# Altium schematic symbol library PTZ.SchLib: 104 symbols (part 4 of 4)
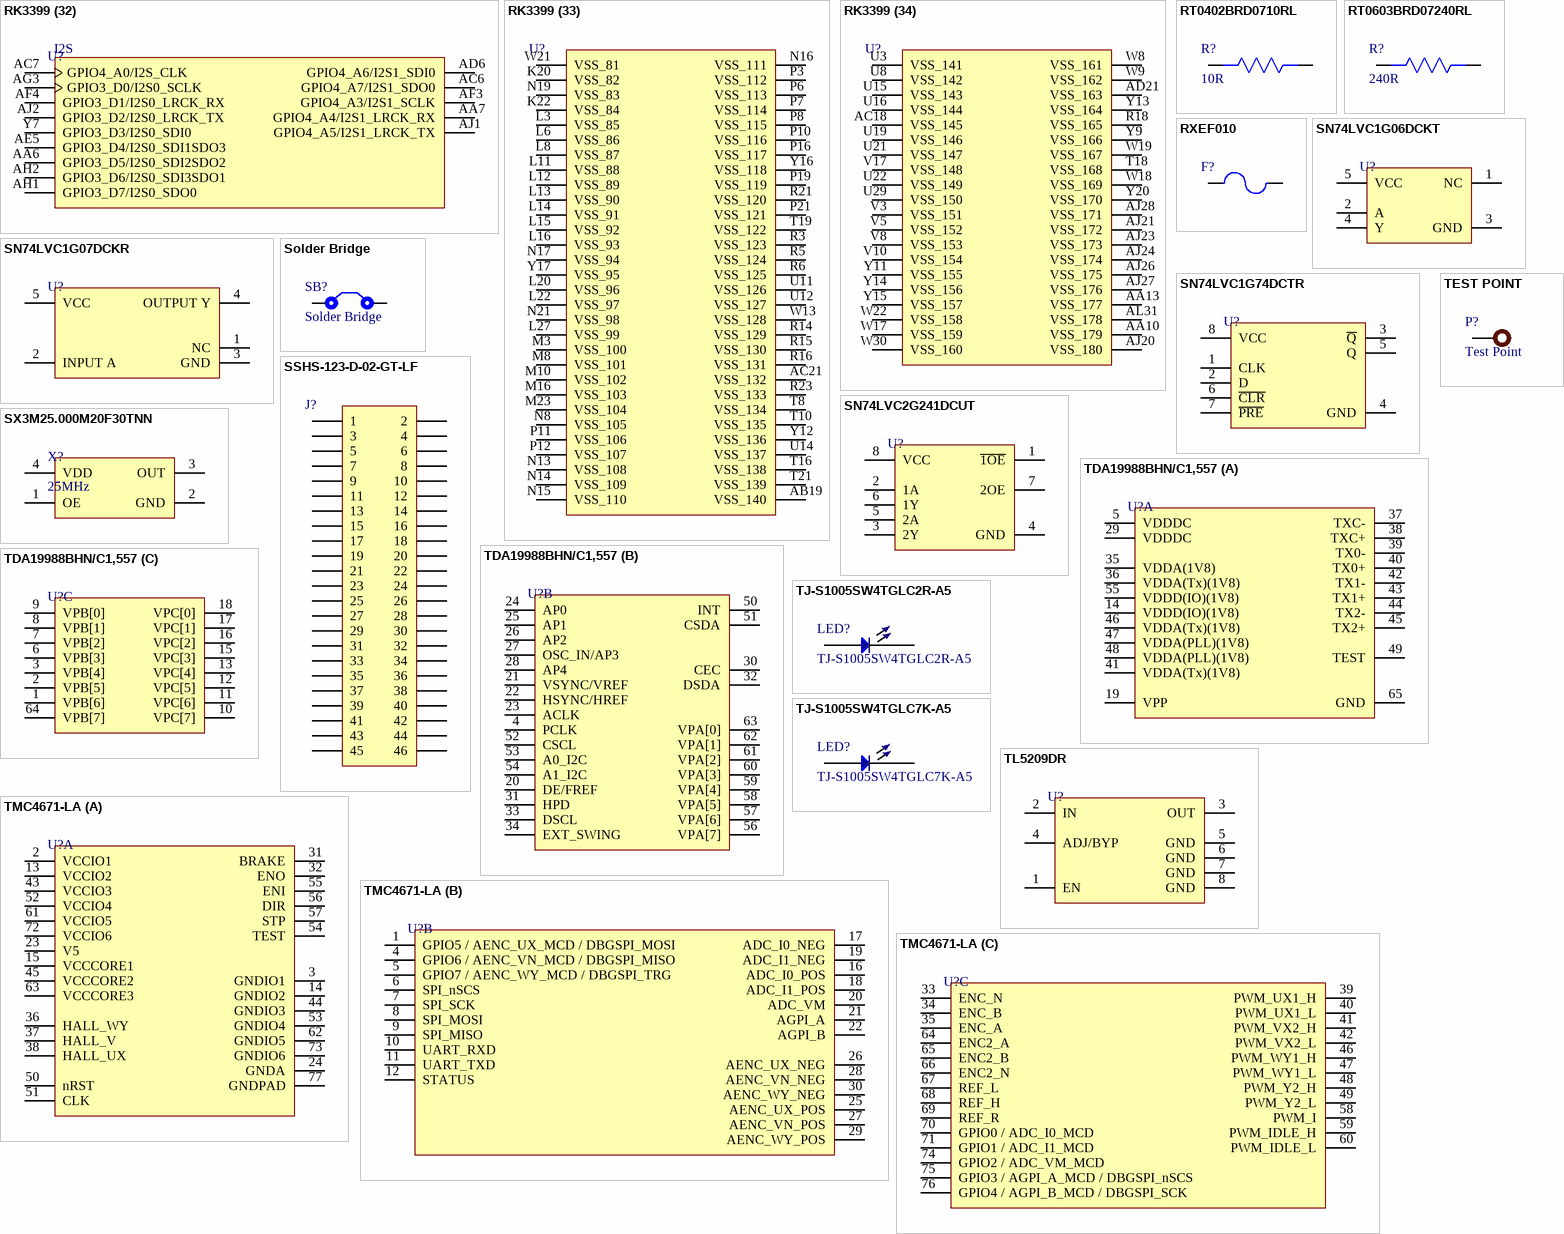
[diagram p9: symbols RK3399 to TMC4671-LA]

## RXEF010
designator F?
PTC RESET FUSE 60V 100MA RADIAL; Manufacturer: TE Connectivity; Manufacturer Part Number: RXEF010; Supplier 1: Avnet; RoHS: Yes; Category: PTC Resettable Fuses; Pricing 1: 1=0.25702, 10=0.24978, 30=0.24254, 50=0.23530, 100=0.22806, 250=0.22082, 500=0.21358 (USD); ComponentLink1URL: https://datasheet.ciiva.com/4501/ng-ss-scd25213-e-166409-4501426.pdf?src-supplier=Mouser; ComponentLink1Description: https://datasheet.ciiva.com/4501/ng-ss-scd25213-e-166409-4501426.pdf?src-supplier=Mouser; ComponentLink2URL: https://datasheet.ciiva.com/30563/rf2579-000-teconnectivitycircuitprotection-30563506.pdf?src-supplier=Onlinecomponents.com; ComponentLink2Description: https://datasheet.ciiva.com/30563/rf2579-000-teconnectivitycircuitprotection-30563506.pdf?src-supplier=Onlinecomponents.com; ComponentLink3URL: https://datasheet.ciiva.com/17090/rxef010-17090552.pdf?src-supplier=Future+Electronics; ComponentLink3Description: https://datasheet.ciiva.com/17090/rxef010-17090552.pdf?src-supplier=Future+Electronics; ComponentLink4URL: https://datasheet.ciiva.com/326/eng-ss-scd25213-e-326021.pdf?src-supplier=Digi-Key; ComponentLink4Description: https://datasheet.ciiva.com/326/eng-ss-scd25213-e-326021.pdf?src-supplier=Digi-Key; ComponentLink5URL: https://datasheet.ciiva.com/31841/eng-cs-radial-leaded-a-31841127.pdf?src-supplier=Onlinecomponents.com; ComponentLink5Description: https://datasheet.ciiva.com/31841/eng-cs-radial-leaded-a-31841127.pdf?src-supplier=Onlinecomponents.com; ComponentLink6URL: https://datasheet.ciiva.com/16207/3922310809194634439223083539498648eng-cs-radial-leaded-a-16207340.pdf?src-supplier=Onlinecomponents.com; ComponentLink6Description: https://datasheet.ciiva.com/16207/3922310809194634439223083539498648eng-cs-radial-leaded-a-16207340.pdf?src-supplier=Onlinecomponents.com; ComponentLink7URL: https://datasheet.ciiva.com/8011/1482689-8011404.pdf?src-supplier=Element14; ComponentLink7Description: https://datasheet.ciiva.com/8011/1482689-8011404.pdf?src-supplier=Element14; Supplier Part Number 1: RXEF010
footprint RXEF010
pins: 1, 2

## SN74LVC1G06DCKT
designator U?
IC BUFFER INVERT 5.5V SC70-5; Manufacturer: Texas Instruments; Manufacturer Part Number: SN74LVC1G06DCKT; Logic Function: Buffer,Inverter; Number of Channels: 1; Min Supply Voltage: 1.65V; Propagation Delay: 3ns; Low Level Output Current: 32mA; Polarity: Inverting; Quiescent Current: 10uA; Turn-On Delay Time: 6.5ns; Supplier 1: Mouser; RoHS: Yes; Category: Buffers, Drivers and Transceivers; Pricing 1: 1=0.94000, 10=0.84500, 50=0.80200, 100=0.65900, 1000=0.61500, 10000=0.61500 (USD); Mount: Surface Mount; Case/Package: SC; Number of Pins: 5; Contact Plating: Gold; Min Operating Temperature: -40°C; Max Operating Temperature: 125°C; Packaging: Tape and Reel; Number of Inputs: 1; Number of Outputs: 1; Max Supply Voltage: 5.5V; Package Quantity: 250; Number of Input Lines: 1; Number of Output Lines: 1; Number of Elements: 1; Number of Gates: 1; Number of Bits: 1; Series: 74LVC; Technology: CMOS; Number of Circuits: 1; Termination: SMD/SMT; Output Current: 32mA; Max Output Current: 32mA; High Level Output Current: 32mA; Radiation Hardening: No; Lead Free: Lead Free; RoHS Compliant: Yes; REACH SVHC: No SVHC; ComponentLink1URL: https://datasheet.ciiva.com/22699/1834831-22699052.pdf?src-supplier=Element14; ComponentLink1Description: https://datasheet.ciiva.com/22699/1834831-22699052.pdf?src-supplier=Element14; ComponentLink2URL: https://datasheet.ciiva.com/15094/getdatasheetpartid-76670-15094549.pdf?src-supplier=Verical; ComponentLink2Description: https://datasheet.ciiva.com/15094/getdatasheetpartid-76670-15094549.pdf?src-supplier=Verical; ComponentLink3URL: https://datasheet.ciiva.com/41456/001017125-da-01-en-ic-single-1in-sn74lvc1g06dckt-sot-5-tid-41456047.pdf?src-supplier=Conrad; ComponentLink3Description: https://datasheet.ciiva.com/41456/001017125-da-01-en-ic-single-1in-sn74lvc1g06dckt-sot-5-tid-41456047.pdf?src-supplier=Conrad; ComponentLink4URL: https://datasheet.ciiva.com/6620/sn74lvc1g06-6620044.pdf?src-supplier=Digi-Key; ComponentLink4Description: https://datasheet.ciiva.com/6620/sn74lvc1g06-6620044.pdf?src-supplier=Digi-Key; ComponentLink5URL: https://datasheet.ciiva.com/6620/sn74lvc1g06-6620042.pdf?src-supplier=Digi-Key; ComponentLink5Description: https://datasheet.ciiva.com/6620/sn74lvc1g06-6620042.pdf?src-supplier=Digi-Key; ComponentLink6URL: https://datasheet.ciiva.com/6620/sn74lvc1g06-6620045.pdf?src-supplier=Digi-Key; ComponentLink6Description: https://datasheet.ciiva.com/6620/sn74lvc1g06-6620045.pdf?src-supplier=Digi-Key; Supplier Part Number 1: 595-SN74LVC1G06DCKT
footprint SC-70-5
pins: 1 NC, 2 A, 3 GND, 4 Y, 5 VCC

## SN74LVC1G07DCKR
designator U?
IC BUF NON-INVERT 5.5V SC70-5; Manufacturer: Texas Instruments; Manufacturer Part Number: SN74LVC1G07DCKR; Number of Channels: 1; Min Supply Voltage: 1.65V; Propagation Delay: 8.3ns; Logic Function: Buffer,Inverting; Low Level Output Current: 32mA; Polarity: Non-Inverting; Quiescent Current: 10uA; Nominal Supply Current: 40mA; Supplier 1: Mouser; RoHS: Yes; Category: Buffers, Drivers and Transceivers; Pricing 1: 1=0.34000, 10=0.25400, 50=0.25400, 100=0.12800, 500=0.09600, 1000=0.07400, 3000=0.05700, 10000=0.05700 (USD); Mount: Surface Mount; Case/Package: SC; Number of Pins: 5; Contact Plating: Gold; Min Operating Temperature: -40°C; Max Operating Temperature: 125°C; Number of Inputs: 1; Number of Outputs: 1; Max Supply Voltage: 5.5V; Packaging: Tape and Reel; Package Quantity: 1; Number of Elements: 1; Number of Input Lines: 1; Number of Output Lines: 1; Number of Bits per Element: 1; Turn-On Delay Time: 8.3ns; Number of Gates: 1; Number of Bits: 1; High Level Output Current: 32mA; Termination: SMD/SMT; Number of Circuits: 1; Radiation Hardening: No; REACH SVHC: No SVHC; Lead Free: Lead Free; RoHS Compliant: Yes; ComponentLink1URL: https://datasheet.ciiva.com/15094/getdatasheetpartid-189690-15094949.pdf?src-supplier=Verical; ComponentLink1Description: https://datasheet.ciiva.com/15094/getdatasheetpartid-189690-15094949.pdf?src-supplier=Verical; ComponentLink2URL: https://datasheet.ciiva.com/4788/sn74lvc1g07-224894-4788496.pdf?src-supplier=Mouser; ComponentLink2Description: https://datasheet.ciiva.com/4788/sn74lvc1g07-224894-4788496.pdf?src-supplier=Mouser; ComponentLink3URL: https://datasheet.ciiva.com/28662/1887570-28662702.pdf?src-supplier=Element14; ComponentLink3Description: https://datasheet.ciiva.com/28662/1887570-28662702.pdf?src-supplier=Element14; ComponentLink4URL: https://datasheet.ciiva.com/46384/1887570-46384078.pdf?src-supplier=Element14; ComponentLink4Description: https://datasheet.ciiva.com/46384/1887570-46384078.pdf?src-supplier=Element14; ComponentLink5URL: https://datasheet.ciiva.com/46442/1856316-46442060.pdf?src-supplier=Element14; ComponentLink5Description: https://datasheet.ciiva.com/46442/1856316-46442060.pdf?src-supplier=Element14; ComponentLink6URL: https://datasheet.ciiva.com/1833/sn74lvc1g07-1833619.pdf?src-supplier=Digi-Key; ComponentLink6Description: https://datasheet.ciiva.com/1833/sn74lvc1g07-1833619.pdf?src-supplier=Digi-Key; ComponentLink7URL: https://datasheet.ciiva.com/1833/sn74lvc1g07-1833618.pdf?src-supplier=Digi-Key; ComponentLink7Description: https://datasheet.ciiva.com/1833/sn74lvc1g07-1833618.pdf?src-supplier=Digi-Key; ComponentLink8URL: https://datasheet.ciiva.com/1833/sn74lvc1g07-1833620.pdf?src-supplier=Digi-Key; ComponentLink8Description: https://datasheet.ciiva.com/1833/sn74lvc1g07-1833620.pdf?src-supplier=Digi-Key; ComponentLink9URL: https://datasheet.ciiva.com/14300/sn74lvc1g07-14300981.pdf?src-supplier=Avnet; ComponentLink9Description: https://datasheet.ciiva.com/14300/sn74lvc1g07-14300981.pdf?src-supplier=Avnet; ComponentLink10URL: https://datasheet.ciiva.com/48704/001075278-da-01-en-ic-buff-dvr-sn74lvc1g07dckr-sc-70-5-tid-48704263.pdf?src-supplier=Conrad; ComponentLink10Description: https://datasheet.ciiva.com/48704/001075278-da-01-en-ic-buff-dvr-sn74lvc1g07dckr-sc-70-5-tid-48704263.pdf?src-supplier=Conrad; Supplier Part Number 1: 595-SN74LVC1G07DCKR
footprint SC-70-5
pins: 1 NC, 2 INPUT A, 3 GND, 4 OUTPUT Y, 5 VCC

## SN74LVC1G74DCTR
designator U?
IC FF D-TYPE SNGL 1BIT SM8; Manufacturer: Texas Instruments; Manufacturer Part Number: SN74LVC1G74DCTR; Propagation Delay: 1.6ns; Max Supply Voltage: 5.5V; Min Supply Voltage: 1.65V; Frequency: 200MHz; Clock Edge Trigger Type: Positive Edge; Output Current: 50mA; Number of Elements: 1; Logic Function: D-Type,Flip-Flop,AND GATE; Low Level Output Current: 32mA; High Level Output Current: -32mA; Polarity: Non-Inverting; Quiescent Current: 10uA; Number of Gates: 2; Supplier 1: Mouser; RoHS: Yes; Category: Latches and Flip Flops; Pricing 1: 1=0.84000, 10=0.73500, 50=0.73500, 100=0.56400, 1000=0.35700, 10000=0.32300 (USD); Mount: Surface Mount; Case/Package: SSOP; Number of Pins: 8; Contact Plating: Gold; Min Operating Temperature: -40°C; Max Operating Temperature: 125°C; Packaging: Tape and Reel; Package Quantity: 3000; Number of Circuits: 1; Number of Bits per Element: 1; Turn-On Delay Time: 1.6ns; Number of Bits: 1; Radiation Hardening: No; REACH SVHC: No SVHC; Lead Free: Lead Free; RoHS Compliant: Yes; ComponentLink1URL: https://datasheet.ciiva.com/22713/1737046-22713435.pdf?src-supplier=Element14; ComponentLink1Description: https://datasheet.ciiva.com/22713/1737046-22713435.pdf?src-supplier=Element14; ComponentLink2URL: https://datasheet.ciiva.com/8055/1874765-8055607.pdf?src-supplier=Element14; ComponentLink2Description: https://datasheet.ciiva.com/8055/1874765-8055607.pdf?src-supplier=Element14; ComponentLink3URL: https://datasheet.ciiva.com/46383/1885964-46383813.pdf?src-supplier=Element14; ComponentLink3Description: https://datasheet.ciiva.com/46383/1885964-46383813.pdf?src-supplier=Element14; ComponentLink4URL: https://datasheet.ciiva.com/1856/sn74lvc1g74-1856665.pdf?src-supplier=Digi-Key; ComponentLink4Description: https://datasheet.ciiva.com/1856/sn74lvc1g74-1856665.pdf?src-supplier=Digi-Key; ComponentLink5URL: https://datasheet.ciiva.com/1856/sn74lvc1g74-1856664.pdf?src-supplier=Digi-Key; ComponentLink5Description: https://datasheet.ciiva.com/1856/sn74lvc1g74-1856664.pdf?src-supplier=Digi-Key; ComponentLink6URL: https://datasheet.ciiva.com/1856/sn74lvc1g74-1856666.pdf?src-supplier=Digi-Key; ComponentLink6Description: https://datasheet.ciiva.com/1856/sn74lvc1g74-1856666.pdf?src-supplier=Digi-Key; ComponentLink7URL: https://datasheet.ciiva.com/14314/sn74lvc1g74-14314669.pdf?src-supplier=Avnet; ComponentLink7Description: https://datasheet.ciiva.com/14314/sn74lvc1g74-14314669.pdf?src-supplier=Avnet; ComponentLink8URL: https://datasheet.ciiva.com/14292/sn74lvc1g74-14292460.pdf?src-supplier=Avnet; ComponentLink8Description: https://datasheet.ciiva.com/14292/sn74lvc1g74-14292460.pdf?src-supplier=Avnet; Supplier Part Number 1: 595-SN74LVC1G74DCTR
footprint SM8
pins: 1 CLK, 2 D, 3 ~{Q}, 4 GND, 5 Q, 6 ~{CLR}, 7 ~{PRE}, 8 VCC

## SN74LVC2G241DCUT
designator U?
IC BUFFER NON-INVERT 5.5V 8VSSOP; Manufacturer: Texas Instruments; Manufacturer Part Number: SN74LVC2G241DCUT; Number of Elements: 2; Min Supply Voltage: 1.65V; Propagation Delay: 3.7ns; Logic Function: Buffer,Inverting; High Level Output Current: -32mA; Low Level Output Current: 32mA; Turn-On Delay Time: 12.5ns; Quiescent Current: 10uA; Number of Bits per Element: 1; Polarity: Non-Inverting; Output Type: 3-STATE; Supplier 1: Arrow Electronics; RoHS: Yes; Category: Buffers, Drivers and Transceivers; Stock 1: 92; Pricing 1: 1=0.68240, 10=0.58260, 25=0.57680 (USD); Mount: Surface Mount; Case/Package: VSSOP; Number of Pins: 8; Contact Plating: Gold; Min Operating Temperature: -40°C; Max Operating Temperature: 125°C; Package Quantity: 250; Packaging: Tape and Reel; Max Supply Voltage: 5.5V; Number of Inputs: 2; Number of Outputs: 2; Number of Input Lines: 2; Number of Output Lines: 2; Termination: SMD/SMT; Number of Gates: 2; Number of Bits: 2; Series: 74LVC; Technology: CMOS; Number of Channels: 2; Radiation Hardening: No; REACH SVHC: No SVHC; Lead Free: Lead Free; RoHS Compliant: Yes; ComponentLink1URL: https://datasheet.ciiva.com/7293/sn74lvc2g241-7293745.pdf?src-supplier=Newark; ComponentLink1Description: https://datasheet.ciiva.com/7293/sn74lvc2g241-7293745.pdf?src-supplier=Newark; ComponentLink2URL: https://datasheet.ciiva.com/7744/1772579-7744032.pdf?src-supplier=Element14; ComponentLink2Description: https://datasheet.ciiva.com/7744/1772579-7744032.pdf?src-supplier=Element14; ComponentLink3URL: https://datasheet.ciiva.com/22704/1831221-22704938.pdf?src-supplier=Element14; ComponentLink3Description: https://datasheet.ciiva.com/22704/1831221-22704938.pdf?src-supplier=Element14; ComponentLink4URL: https://datasheet.ciiva.com/41455/001017182-da-01-en-ic-b-dvr-dl-sn74lvc2g241dcut-vssop-8-tid-41455961.pdf?src-supplier=Conrad; ComponentLink4Description: https://datasheet.ciiva.com/41455/001017182-da-01-en-ic-b-dvr-dl-sn74lvc2g241dcut-vssop-8-tid-41455961.pdf?src-supplier=Conrad; ComponentLink5URL: https://datasheet.ciiva.com/6622/sn74lvc2g241-6622471.pdf?src-supplier=Digi-Key; ComponentLink5Description: https://datasheet.ciiva.com/6622/sn74lvc2g241-6622471.pdf?src-supplier=Digi-Key; Supplier Part Number 1: SN74LVC2G241DCUT
footprint 8-VSSOP
pins: 1 ~{1OE}, 2 1A, 3 2Y, 4 GND, 5 2A, 6 1Y, 7 2OE, 8 VCC

## Solder Bridge
designator SB?
Solder Bridge ON
footprint Solder Bridge (Solder Bridge ON)
pins: 1, 2

## SSHS-123-D-02-GT-LF
designator J?
46 Position Dual Row (23 x 2) 2.54 mm Pitch Female Strip Socket; Manufacturer: Major League Electronics; Manufacturer Part Number: SSHS-123-D-02-GT-LF; Supplier 1: Future Electronics; RoHS: No; Category: Connectors; Stock 1: 1356; Pricing 1: 1=2.49000, 30=2.20000, 100=2.11000, 200=2.06000, 500=1.99000 (USD); Lead Free: Lead Free; Supplier Part Number 1: 1043473
footprint SSHS-123-D-02-GT-LF
pins: 1, 2, 3, 4, 5, 6, 7, 8, 9, 10, 11, 12, 13, 14, 15, 16, 17, 18, 19, 20, 21, 22, 23, 24, 25, 26, 27, 28, 29, 30, 31, 32, 33, 34, 35, 36, 37, 38, 39, 40, 41, 42, 43, 44, 45, 46

## SX3M25.000M20F30TNN
designator X?, comment 25MHz
1.62V~3.63V -40℃~+85℃ 10mA ±20ppm CMOS 25MHz SMD3225-4P Oscillators ROHS; Manufacturer: SCTF Elec; Manufacturer Part Number: SX3M25.000M20F30TNN; ComponentLink1Description: LCSC; ComponentLink1URL: https://lcsc.com/product-detail/Oscillators_Shenzhen-SCTF-Elec-SX3M25-000M20F30TNN_C2901575.html; Footprint: Custom
footprint SX3M25.000M20F30TNN
pins: 1 OE, 2 GND, 3 OUT, 4 VDD

## TDA19988BHN/C1,557
designator U?
IC Video Hdmi Trans 64HVQFN; Manufacturer: NXP Semiconductors; Manufacturer Part Number: TDA19988BHN/C1,557; Operating Supply Voltage: 1.8V; Number of Transmitters: 1; Number of Channels: 3; Supplier 1: Arrow Electronics; RoHS: No; Category: Integrated Circuits (ICs); Stock 1: 3973; Pricing 1: 1=6.10100, 10=5.44000, 25=4.63100 (USD); Mount: Surface Mount; Case/Package: TFBGA; Number of Pins: 64; Packaging: Tray; Radiation Hardening: No; Lead Free: Lead Free; ComponentLink1URL: http://components.arrow.com/part/dataview/51407123S455509N7788?src-supplier=Arrow+Electronics; ComponentLink1Description: http://components.arrow.com/part/dataview/51407123S455509N7788?src-supplier=Arrow+Electronics; ComponentLink2URL: http://www.mouser.com/ds/2/302/NXP_TDA19988-838481.pdf?src-supplier=Mouser; ComponentLink2Description: http://www.mouser.com/ds/2/302/NXP_TDA19988-838481.pdf?src-supplier=Mouser; ComponentLink3URL: https://media.digikey.com/pdf/Data%20Sheets/NXP%20PDFs/TDA19988_DS_21_july_2011.pdf?src-supplier=Digi-Key; ComponentLink3Description: https://media.digikey.com/pdf/Data%20Sheets/NXP%20PDFs/TDA19988_DS_21_july_2011.pdf?src-supplier=Digi-Key; ComponentLink4URL: http://www.nxp.com/products/interface_and_connectivity/hdmi/hdmi_transmitters/TDA19988BHN.html#ordering?src-supplier=Avnet; ComponentLink4Description: http://www.nxp.com/products/interface_and_connectivity/hdmi/hdmi_transmitters/TDA19988BHN.html#ordering?src-supplier=Avnet; Supplier Part Number 1: TDA19988BHN/C1,557
footprint 64-HVQFN (9x9)
part A pins: 5 VDDDC, 14 VDDD(IO)(1V8), 19 VPP, 29 VDDDC, 35 VDDA(1V8), 36 VDDA(Tx)(1V8), 37 TXC-, 38 TXC+, 39 TX0-, 40 TX0+, 41 VDDA(Tx)(1V8), 42 TX1-, 43 TX1+, 44 TX2-, 45 TX2+, 46 VDDA(Tx)(1V8), 47 VDDA(PLL)(1V8), 48 VDDA(PLL)(1V8), 49 TEST, 55 VDDD(IO)(1V8), 65 GND
part B pins: 4 PCLK, 20 DE/FREF, 21 VSYNC/VREF, 22 HSYNC/HREF, 23 ACLK, 24 AP0, 25 AP1, 26 AP2, 27 OSC_IN/AP3, 28 AP4, 30 CEC, 31 HPD, 32 DSDA, 33 DSCL, 34 EXT_SWING, 50 INT, 51 CSDA, 52 CSCL, 53 A0_I2C, 54 A1_I2C, 56 VPA[7], 57 VPA[6], 58 VPA[5], 59 VPA[4], 60 VPA[3], 61 VPA[2], 62 VPA[1], 63 VPA[0]
part C pins: 1 VPB[6], 2 VPB[5], 3 VPB[4], 6 VPB[3], 7 VPB[2], 8 VPB[1], 9 VPB[0], 10 VPC[7], 11 VPC[6], 12 VPC[5], 13 VPC[4], 15 VPC[3], 16 VPC[2], 17 VPC[1], 18 VPC[0], 64 VPB[7]

## TEST POINT
designator P?, comment Test Point
Test Point ON
footprint TEST POINT
pins: 1

## TJ-S1005SW4TGLC2R-A5
designator LED?
Red 625nm 0402 Light Emitting Diodes (LED) RoHS; Manufacturer: TOGIALED; Manufacturer Part No: TJ-S1005SW4TGLC2R-A5; Package: 0402
footprint LED 0402
pins: 1, 2

## TJ-S1005SW4TGLC7K-A5
designator LED?
Green 573nm 0402 Light Emitting Diodes (LED) RoHS; Manufacturer: TOGIALED; Value: Custom; Manufacturer Part No: TJ-S1005SW4TGLC7K-A5; Package: 0402
footprint LED 0402
pins: 1, 2

## TL5209DR
designator U?
IC REG LDO ADJ 0.5A 8SOIC; Manufacturer: Texas Instruments; Manufacturer Part Number: TL5209DR; Dropout Voltage: 500mV; Output Current: 500mA; Number of Outputs: 1; Output Voltage: 6.5V; Max Input Voltage: 16V; Min Input Voltage: 2.5V; Input Bias Current: 100uA; Quiescent Current: 8mA; Accuracy: 2%; Polarity: Positive; Output Voltage Accuracy: 1%; Output Type: Adjustable; Supplier 1: Mouser; RoHS: Yes; Category: Voltage Regulators - Linear; Pricing 1: 1=1.31000, 10=1.18000, 50=1.12000, 100=0.92000, 1000=0.60000, 10000=0.58000 (USD); Case/Package: D; Number of Pins: 8; Contact Plating: Gold; Min Operating Temperature: -40°C; Max Operating Temperature: 125°C; Package Quantity: 1; Packaging: Tape and Reel; Max Output Current: 500mA; Number of Regulators: 1; Min Output Voltage: 2.5V; Max Output Voltage: 6.5V; Length: 5mm; Width: 4mm; Height: 1.5mm; Radiation Hardening: No; Lead Free: Lead Free; RoHS Compliant: Yes; REACH SVHC: No SVHC; ComponentLink1URL: https://datasheet.ciiva.com/2043/tl5209-2043884.pdf?src-supplier=Digi-Key; ComponentLink1Description: https://datasheet.ciiva.com/2043/tl5209-2043884.pdf?src-supplier=Digi-Key; ComponentLink2URL: https://datasheet.ciiva.com/2043/tl5209-2043883.pdf?src-supplier=Digi-Key; ComponentLink2Description: https://datasheet.ciiva.com/2043/tl5209-2043883.pdf?src-supplier=Digi-Key; ComponentLink3URL: https://datasheet.ciiva.com/2043/tl5209-2043885.pdf?src-supplier=Digi-Key; ComponentLink3Description: https://datasheet.ciiva.com/2043/tl5209-2043885.pdf?src-supplier=Digi-Key; Supplier Part Number 1: 595-TL5209DR
footprint SOIC-8
pins: 1 EN, 2 IN, 3 OUT, 4 ADJ/BYP, 5 GND, 6 GND, 7 GND, 8 GND

## TMC4671-LA
designator U?
SERVO CONTROLLER IC, QFN76; Manufacturer: Trinamic; Manufacturer Part Number: TMC4671-LA; Supplier 1: Mouser; RoHS: No; Category: Motor Drivers; Pricing 1: 1=12.54000, 10=11.53000, 25=11.05000, 50=11.05000, 100=9.26000, 261=8.66000, 522=8.05000, 1000=8.05000, 1044=7.64000, 10000=7.64000 (USD); Supplier Part Number 1: 700-TMC4671-LA
footprint 76-QFN (10.5x6.5)
part A pins: 2 VCCIO1, 3 GNDIO1, 13 VCCIO2, 14 GNDIO2, 15 VCCCORE1, 23 V5, 24 GNDA, 31 BRAKE, 32 ENO, 36 HALL_WY, 37 HALL_V, 38 HALL_UX, 43 VCCIO3, 44 GNDIO3, 45 VCCCORE2, 50 nRST, 51 CLK, 52 VCCIO4, 53 GNDIO4, 54 TEST, 55 ENI, 56 DIR, 57 STP, 61 VCCIO5, 62 GNDIO5, 63 VCCCORE3, 72 VCCIO6, 73 GNDIO6, 77 GNDPAD
part B pins: 1 GPIO5 / AENC_UX_MCD / DBGSPI_MOSI, 4 GPIO6 / AENC_VN_MCD / DBGSPI_MISO, 5 GPIO7 / AENC_WY_MCD / DBGSPI_TRG, 6 SPI_nSCS, 7 SPI_SCK, 8 SPI_MOSI, 9 SPI_MISO, 10 UART_RXD, 11 UART_TXD, 12 STATUS, 16 ADC_I0_POS, 17 ADC_I0_NEG, 18 ADC_I1_POS, 19 ADC_I1_NEG, 20 ADC_VM, 21 AGPI_A, 22 AGPI_B, 25 AENC_UX_POS, 26 AENC_UX_NEG, 27 AENC_VN_POS, 28 AENC_VN_NEG, 29 AENC_WY_POS, 30 AENC_WY_NEG
part C pins: 33 ENC_N, 34 ENC_B, 35 ENC_A, 39 PWM_UX1_H, 40 PWM_UX1_L, 41 PWM_VX2_H, 42 PWM_VX2_L, 46 PWM_WY1_H, 47 PWM_WY1_L, 48 PWM_Y2_H, 49 PWM_Y2_L, 58 PWM_I, 59 PWM_IDLE_H, 60 PWM_IDLE_L, 64 ENC2_A, 65 ENC2_B, 66 ENC2_N, 67 REF_L, 68 REF_H, 69 REF_R, 70 GPIO0 / ADC_I0_MCD, 71 GPIO1 / ADC_I1_MCD, 74 GPIO2 / ADC_VM_MCD, 75 GPIO3 / AGPI_A_MCD / DBGSPI_nSCS, 76 GPIO4 / AGPI_B_MCD / DBGSPI_SCK

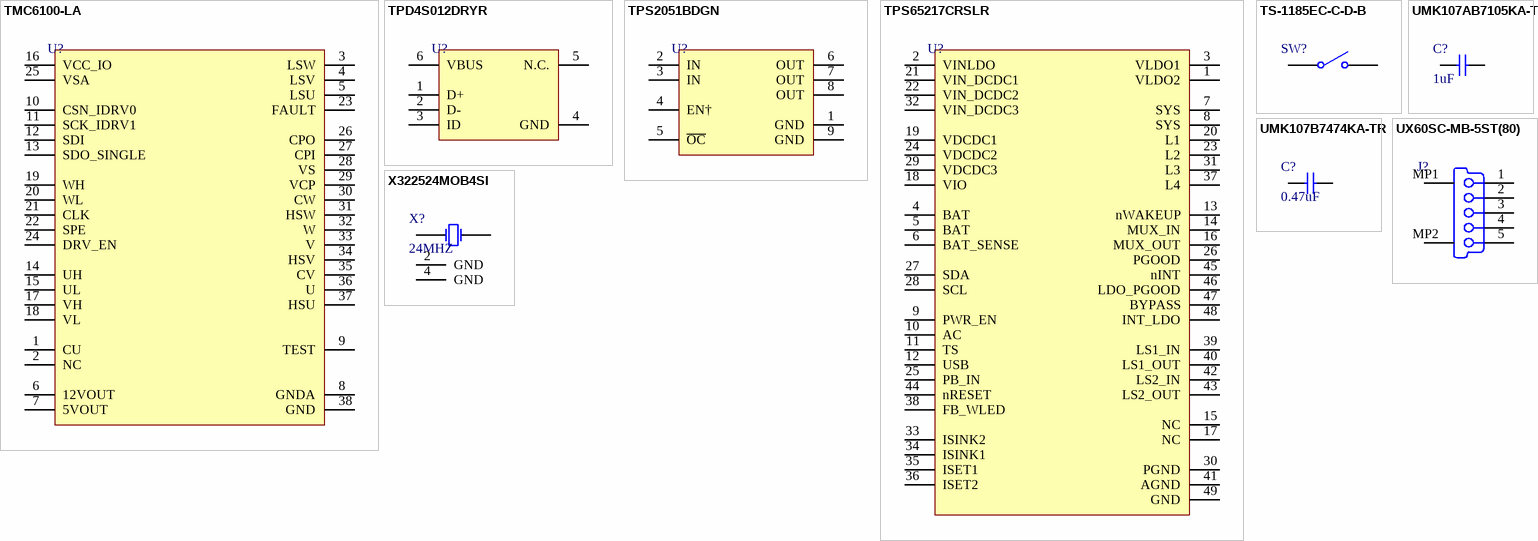
[diagram p6: symbols TMC6100-LA to X322524MOB4SI]

## TMC6100-LA
designator U?
GATE DRIVER IC 8-60V QFN37; Manufacturer: Trinamic; Manufacturer Part Number: TMC6100-LA; Supplier 1: Mouser; RoHS: No; Stock 1: 19; Pricing 1: 1=4.30000, 10=3.65000, 50=3.65000, 100=3.00000, 250=2.69000, 416=2.59000, 832=2.15000, 1000=2.15000, 2912=2.07000, 5408=2.00000, 10000=2.07000, 10400=1.95000 (USD); Supplier Part Number 1: 700-TMC6100LA
footprint 37-QFN-EP (7x7)
pins: 1 CU, 2 NC, 3 LSW, 4 LSV, 5 LSU, 6 12VOUT, 7 5VOUT, 8 GNDA, 9 TEST, 10 CSN_IDRV0, 11 SCK_IDRV1, 12 SDI, 13 SDO_SINGLE, 14 UH, 15 UL, 16 VCC_IO, 17 VH, 18 VL, 19 WH, 20 WL, 21 CLK, 22 SPE, 23 FAULT, 24 DRV_EN, 25 VSA, 26 CPO, 27 CPI, 28 VS, 29 VCP, 30 CW, 31 HSW, 32 W, 33 V, 34 HSV, 35 CV, 36 U, 37 HSU, 38 GND

## TPD4S012DRYR
designator U?
TVS DIODE 5.5VWM 6SON; Manufacturer: Texas Instruments; Manufacturer Part Number: TPD4S012DRYR; Capacitance: 15pF; Direction: Unidirectional; Operating Supply Voltage: 950mV; Number of Circuits: 4; Breakdown Voltage: 24V; Max Power Dissipation: 60W; Working Voltage: 19V; Min Breakdown Voltage: 6V; ESD Protection: Yes; Test Current: 1mA; Peak Pulse Current: 3A; Interface: USB; Supplier 1: Mouser; RoHS: Yes; Category: TVS Diodes; Stock 1: 108588; Pricing 1: 1=0.85000, 10=0.76000, 50=0.76000, 100=0.58300, 1000=0.38100, 10000=0.38000 (USD); Number of Pins: 6; Min Operating Temperature: -40°C; Max Operating Temperature: 85°C; Packaging: Tape and Reel; Package Quantity: 5000; Polarity: Unidirectional; Number of Channels: 4; Termination: SMD/SMT; Peak Pulse Power: 60W; Length: 1.45mm; Width: 1.05mm; Height: 0.55mm; Depth: 1mm; Radiation Hardening: No; REACH SVHC: No SVHC; Lead Free: Lead Free; RoHS Compliant: Yes; ComponentLink1URL: https://datasheet.ciiva.com/1271/1719848-1271898.pdf?src-supplier=Farnell; ComponentLink1Description: https://datasheet.ciiva.com/1271/1719848-1271898.pdf?src-supplier=Farnell; ComponentLink2URL: https://datasheet.ciiva.com/361/tpd4s012-361280.pdf?src-supplier=Digi-Key; ComponentLink2Description: https://datasheet.ciiva.com/361/tpd4s012-361280.pdf?src-supplier=Digi-Key; ComponentLink3URL: https://datasheet.ciiva.com/4479/slvs928a-120928-4479536.pdf?src-supplier=Mouser; ComponentLink3Description: https://datasheet.ciiva.com/4479/slvs928a-120928-4479536.pdf?src-supplier=Mouser; ComponentLink4URL: https://datasheet.ciiva.com/1268/tpd4s012-1268381.pdf?src-supplier=Element14; ComponentLink4Description: https://datasheet.ciiva.com/1268/tpd4s012-1268381.pdf?src-supplier=Element14; ComponentLink5URL: https://datasheet.ciiva.com/22621/1857625-22621486.pdf?src-supplier=Element14; ComponentLink5Description: https://datasheet.ciiva.com/22621/1857625-22621486.pdf?src-supplier=Element14; ComponentLink6URL: https://datasheet.ciiva.com/28496/tpd4s012-28496124.pdf?src-supplier=Element14; ComponentLink6Description: https://datasheet.ciiva.com/28496/tpd4s012-28496124.pdf?src-supplier=Element14; ComponentLink7URL: https://datasheet.ciiva.com/46381/1857625-46381802.pdf?src-supplier=Element14; ComponentLink7Description: https://datasheet.ciiva.com/46381/1857625-46381802.pdf?src-supplier=Element14; ComponentLink8URL: https://datasheet.ciiva.com/361/tpd4s012-361279.pdf?src-supplier=Digi-Key; ComponentLink8Description: https://datasheet.ciiva.com/361/tpd4s012-361279.pdf?src-supplier=Digi-Key; ComponentLink9URL: https://datasheet.ciiva.com/361/tpd4s012-361278.pdf?src-supplier=Digi-Key; ComponentLink9Description: https://datasheet.ciiva.com/361/tpd4s012-361278.pdf?src-supplier=Digi-Key; Supplier Part Number 1: 595-TPD4S012DRYR
footprint 6-SON (1.45x1)
pins: 1 D+, 2 D-, 3 ID, 4 GND, 5 N.C., 6 VBUS

## TPS2051BDGN
designator U?
IC 0.5A POWER DIST SW 8-MSOP; Manufacturer: Texas Instruments; Manufacturer Part Number: TPS2051BDGNR; Number of Outputs: 1; Min Supply Voltage: 2.7V; Max Supply Voltage: 5.5V; Max Power Dissipation: 1.7123W; Nominal Supply Current: 43uA; Turn-Off Delay Time: 10ms; On-State Resistance: 70mR; Turn-On Delay Time: 3ms; Supplier 1: Mouser; RoHS: Yes; Category: Hot Swap Controllers; Pricing 1: 1=1.12000, 10=1.01000, 25=0.95300, 50=0.95300, 100=0.78300, 250=0.73200, 500=0.64700, 1000=0.51100, 10000=0.51100 (USD); Mount: Surface Mount; Case/Package: MSOP; Number of Pins: 8; Min Operating Temperature: -40°C; Max Operating Temperature: 85°C; Package Quantity: 1; Packaging: Tape and Reel; Radiation Hardening: No; Lead Free: Lead Free; RoHS Compliant: Yes; REACH SVHC: No SVHC; ComponentLink1URL: https://datasheet.ciiva.com/15108/getdatasheetpartid-252553-15108488.pdf?src-supplier=Verical; ComponentLink1Description: https://datasheet.ciiva.com/15108/getdatasheetpartid-252553-15108488.pdf?src-supplier=Verical; ComponentLink2URL: https://datasheet.ciiva.com/1572/tps2042b-1572740.pdf?src-supplier=Farnell; ComponentLink2Description: https://datasheet.ciiva.com/1572/tps2042b-1572740.pdf?src-supplier=Farnell; ComponentLink3URL: https://datasheet.ciiva.com/1512/1849904-1512656.pdf?src-supplier=Element14; ComponentLink3Description: https://datasheet.ciiva.com/1512/1849904-1512656.pdf?src-supplier=Element14; ComponentLink4URL: https://datasheet.ciiva.com/1512/1882062-1512655.pdf?src-supplier=Element14; ComponentLink4Description: https://datasheet.ciiva.com/1512/1882062-1512655.pdf?src-supplier=Element14; ComponentLink5URL: https://datasheet.ciiva.com/46418/1801484-46418997.pdf?src-supplier=Element14; ComponentLink5Description: https://datasheet.ciiva.com/46418/1801484-46418997.pdf?src-supplier=Element14; ComponentLink6URL: https://datasheet.ciiva.com/1962/tps2051b-1962497.pdf?src-supplier=Digi-Key; ComponentLink6Description: https://datasheet.ciiva.com/1962/tps2051b-1962497.pdf?src-supplier=Digi-Key; ComponentLink7URL: https://datasheet.ciiva.com/1962/tps2051b-1962496.pdf?src-supplier=Digi-Key; ComponentLink7Description: https://datasheet.ciiva.com/1962/tps2051b-1962496.pdf?src-supplier=Digi-Key; ComponentLink8URL: https://datasheet.ciiva.com/1962/tps2051b-1962498.pdf?src-supplier=Digi-Key; ComponentLink8Description: https://datasheet.ciiva.com/1962/tps2051b-1962498.pdf?src-supplier=Digi-Key; Supplier Part Number 1: 595-TPS2051BDGNR
footprint 8-HVSSOP
pins: 1 GND, 2 IN, 3 IN, 4 EN†, 5 ~{OC}, 6 OUT, 7 OUT, 8 OUT, 9 GND

## TPS65217CRSLR
designator U?
IC PMIC BATT PWR SYST 48VQFN; Manufacturer: Texas Instruments; Manufacturer Part Number: TPS65217CRSLR; Operating Supply Voltage: 5.8V; Supplier 1: Mouser; RoHS: Yes; Category: Power Management ICs; Pricing 1: 1=6.01000, 10=5.40000, 50=5.10000, 100=4.42000, 1000=3.29000, 10000=3.28000 (USD); Mount: Surface Mount; Case/Package: VQFN; Number of Pins: 48; Contact Plating: Gold; Min Operating Temperature: -40°C; Max Operating Temperature: 105°C; Packaging: Tape and Reel; Package Quantity: 2500; Type: Integrated Circuit (IC); Series: TPS65217C; Length: 6mm; Height: 0.9mm; REACH SVHC: No SVHC; Lead Free: Lead Free; RoHS Compliant: Yes; ComponentLink1URL: https://datasheet.ciiva.com/6601/tps65217-6601230.pdf?src-supplier=Digi-Key; ComponentLink1Description: https://datasheet.ciiva.com/6601/tps65217-6601230.pdf?src-supplier=Digi-Key; ComponentLink2URL: https://datasheet.ciiva.com/6601/tps65217-6601225.pdf?src-supplier=Digi-Key; ComponentLink2Description: https://datasheet.ciiva.com/6601/tps65217-6601225.pdf?src-supplier=Digi-Key; Supplier Part Number 1: 595-TPS65217CRSLR
footprint VQFN-48_7x7x05P
pins: 1 VLDO2, 2 VINLDO, 3 VLDO1, 4 BAT, 5 BAT, 6 BAT_SENSE, 7 SYS, 8 SYS, 9 PWR_EN, 10 AC, 11 TS, 12 USB, 13 nWAKEUP, 14 MUX_IN, 15 NC, 16 MUX_OUT, 17 NC, 18 VIO, 19 VDCDC1, 20 L1, 21 VIN_DCDC1, 22 VIN_DCDC2, 23 L2, 24 VDCDC2, 25 PB_IN, 26 PGOOD, 27 SDA, 28 SCL, 29 VDCDC3, 30 PGND, 31 L3, 32 VIN_DCDC3, 33 ISINK2, 34 ISINK1, 35 ISET1, 36 ISET2, 37 L4, 38 FB_WLED, 39 LS1_IN, 40 LS1_OUT, 41 AGND, 42 LS2_IN, 43 LS2_OUT, 44 nRESET, 45 nINT, 46 LDO_PGOOD, 47 BYPASS, 48 INT_LDO, 49 GND

## TS-1185EC-C-D-B
designator SW?
3mm 2mm Round Button 50mA Top3.65mm SPST 12V SMD Tactile Switches; Manufacturer: XKB; Manufacturer Part Number: TS-1185EC-C-D-B; Footprint: Custom; ComponentLink1Description: LCSC; ComponentLink1URL: https://lcsc.com/product-detail/Tactile-Switches_XKB-Connectivity-TS-1185EC-C-D-B_C318893.html
footprint TS-1185EC-C-D-B
pins: 1, 2

## UMK107AB7105KA-T
designator C?, comment 1uF
CAP CER 1UF 50V X7R 0603; Manufacturer: Taiyo Yuden; Manufacturer Part Number: UMK107AB7105KA-T; Tolerance: 10%; ComponentLink1URL: http://www.farnell.com/datasheets/2048165.pdf?src-supplier=Element14; ComponentLink1Description: http://www.farnell.com/datasheets/2048165.pdf?src-supplier=Element14; ComponentLink2URL: https://www.murata.com/~/media/webrenewal/support/library/catalog/products/capacitor/mlcc/c02e.ashx?la=en-us&src-supplier=Digi-Key; ComponentLink2Description: https://www.murata.com/~/media/webrenewal/support/library/catalog/products/capacitor/mlcc/c02e.ashx?la=en-us&src-supplier=Digi-Key; Supplier 1: Digi-Key; Stock 1: 453098; Pricing 1: 1=0.28, 10=0.19, 100=0.1079, 500=0.0762, 1000=0.0667 (USD); Mount: Surface Mount; Case/Package: 0603; Case Code (Metric): 1608; Case Code (Imperial): 0603; Min Operating Temperature: -55°C; Max Operating Temperature: 125°C; Packaging: Tape and Reel; Package Quantity: 1; Capacitance: 1uF; Voltage Rating: 50V; Voltage Rating (DC): 50V; Dielectric: X7R; Termination: SMD/SMT; Length: 1.6mm; Height: 0.8mm; Width: 0.031inch; Thickness: 0.037inch; Depth: 0.8mm; Radiation Hardening: No; Halogen Free: Halogen Free; ComponentLink3URL: https://www.yuden.co.jp/productdata/catalog/mlcc_all_e.pdf?src-supplier=Digi-Key; ComponentLink3Description: https://www.yuden.co.jp/productdata/catalog/mlcc_all_e.pdf?src-supplier=Digi-Key; ComponentLink4URL: https://www.yuden.co.jp/productdata/catalog/mlcc_all_e.pdf?src-supplier=Onlinecomponents.com; ComponentLink4Description: https://www.yuden.co.jp/productdata/catalog/mlcc_all_e.pdf?src-supplier=Onlinecomponents.com; Supplier Part Number 1: 587-3247-1-ND
footprint Cap0603
pins: 1, 2

## UMK107B7474KA-TR
designator C?, comment 0.47uF
CAP CER 0.47uF 50V X7R 0603; Manufacturer: Taiyo Yuden; Manufacturer Part Number: UMK107B7474KA-TR; Tolerance: 10%; Capacitance: 470nF; Supplier 1: Digi-Key; RoHS: Yes; Category: Ceramic Capacitors; Stock 1: 81; Pricing 1: 1=0.21000, 10=0.14800, 50=0.08400, 100=0.06950, 500=0.04876, 1000=0.04036 (USD); Mount: Surface Mount; Case/Package: 0603; Case Code (Metric): 1608; Case Code (Imperial): 0603; Min Operating Temperature: -55°C; Max Operating Temperature: 125°C; Packaging: Tape and Reel; Voltage Rating: 50V; Package Quantity: 1; Dielectric: X7R; Termination: SMD/SMT; Voltage: 50V; Series: M; Voltage Rating (DC): 50V; Construction: Flat; Length: 1.6mm; Width: 0.031inch; Height: 0.8mm; Depth: 0.8mm; Thickness: 0.035inch; Radiation Hardening: No; RoHS Compliant: Yes; Lead Free: Lead Free; Halogen Free: Halogen Free; ComponentLink1URL: https://datasheet.ciiva.com/30063/972umk107b7474ka-tr-30063804.pdf?src-supplier=Onlinecomponents.com; ComponentLink1Description: https://datasheet.ciiva.com/30063/972umk107b7474ka-tr-30063804.pdf?src-supplier=Onlinecomponents.com; ComponentLink2URL: https://datasheet.ciiva.com/11600/umk107b7474ka-tr-ss-11600367.pdf?src-supplier=Avnet; ComponentLink2Description: https://datasheet.ciiva.com/11600/umk107b7474ka-tr-ss-11600367.pdf?src-supplier=Avnet; ComponentLink3URL: https://datasheet.ciiva.com/15922/257umk107b7474ka-tr-15922607.pdf?src-supplier=Onlinecomponents.com; ComponentLink3Description: https://datasheet.ciiva.com/15922/257umk107b7474ka-tr-15922607.pdf?src-supplier=Onlinecomponents.com; ComponentLink4URL: https://datasheet.ciiva.com/6274/mlcc-all-e-6274710.pdf?src-supplier=Digi-Key; ComponentLink4Description: https://datasheet.ciiva.com/6274/mlcc-all-e-6274710.pdf?src-supplier=Digi-Key; ComponentLink5URL: https://datasheet.ciiva.com/5412/mlcc01-e-5412119.pdf?src-supplier=Mouser; ComponentLink5Description: https://datasheet.ciiva.com/5412/mlcc01-e-5412119.pdf?src-supplier=Mouser; ComponentLink6URL: https://datasheet.ciiva.com/6274/mlcc-all-e-6274712.pdf?src-supplier=Digi-Key; ComponentLink6Description: https://datasheet.ciiva.com/6274/mlcc-all-e-6274712.pdf?src-supplier=Digi-Key; ComponentLink7URL: https://datasheet.ciiva.com/6274/mlcc-all-e-6274713.pdf?src-supplier=Digi-Key; ComponentLink7Description: https://datasheet.ciiva.com/6274/mlcc-all-e-6274713.pdf?src-supplier=Digi-Key; Supplier Part Number 1: 587-3170-1-ND
footprint Cap0603
pins: 1, 2

## UX60SC-MB-5ST(80)
designator J?
CONN RCPT USB2.0 MINI B SMD R/A; Manufacturer: Hirose; Manufacturer Part Number: UX60SC-MB-5ST(80); Supplier 1: RSComponents; RoHS: Yes; Category: Connectors; Stock 1: 1; Pricing 1: 10=0.67900, 50=0.64500, 100=0.61700, 250=0.58600, 500=0.53900 (USD); ComponentLink1URL: https://datasheet.ciiva.com/4598/e24000153-34949-4598883.pdf?src-supplier=Mouser; ComponentLink1Description: https://datasheet.ciiva.com/4598/e24000153-34949-4598883.pdf?src-supplier=Mouser; Supplier Part Number 1: 1750645
footprint UX60SC-MB-5ST(80)
pins: 1 V BUS (5V) "USB Vcc [Red]", 2 D- "USB Data - [White]", 3 D+ "USB Data + [Green]", 4 NC "Not Connected (or joined to pin 5 via resistor)", 5 GND "Ground [Black]", MP1 Tab "Shell", MP2 Tab "Shell"

## X322524MOB4SI
designator X?, comment 24MHZ
24MHz SMD Crystal Resonator 12pF ±10ppm ±30ppm -40℃~+85℃ SMD3225-4P Crystals ROHS; Manufacturer: Yangxing Tech; Manufacturer Part Number: X322524MOB4SI; ComponentLink1Description: LCSC; ComponentLink1URL: https://www.lcsc.com/product-detail/Crystals_Yangxing-Tech-X322524MOB4SI_C70590.html; Footprint: Custom
footprint X322524MOB4SI
pins: 1 CRYSTAL, 2 GND, 3 CRYSTAL, 4 GND